# Altium footprint library poyu.PcbLib: 22 footprints (part 1 of 2)
Each footprint in its own frame and in the unit in brackets; x right, y up, seen from the top. Pads: shape width x height; smd on the part's side, far side on the other; paste and mask are expansions set on the pad; w line width, h text height; cw(c..) or ccw(c..) is an arc to the next point about the centre after c.
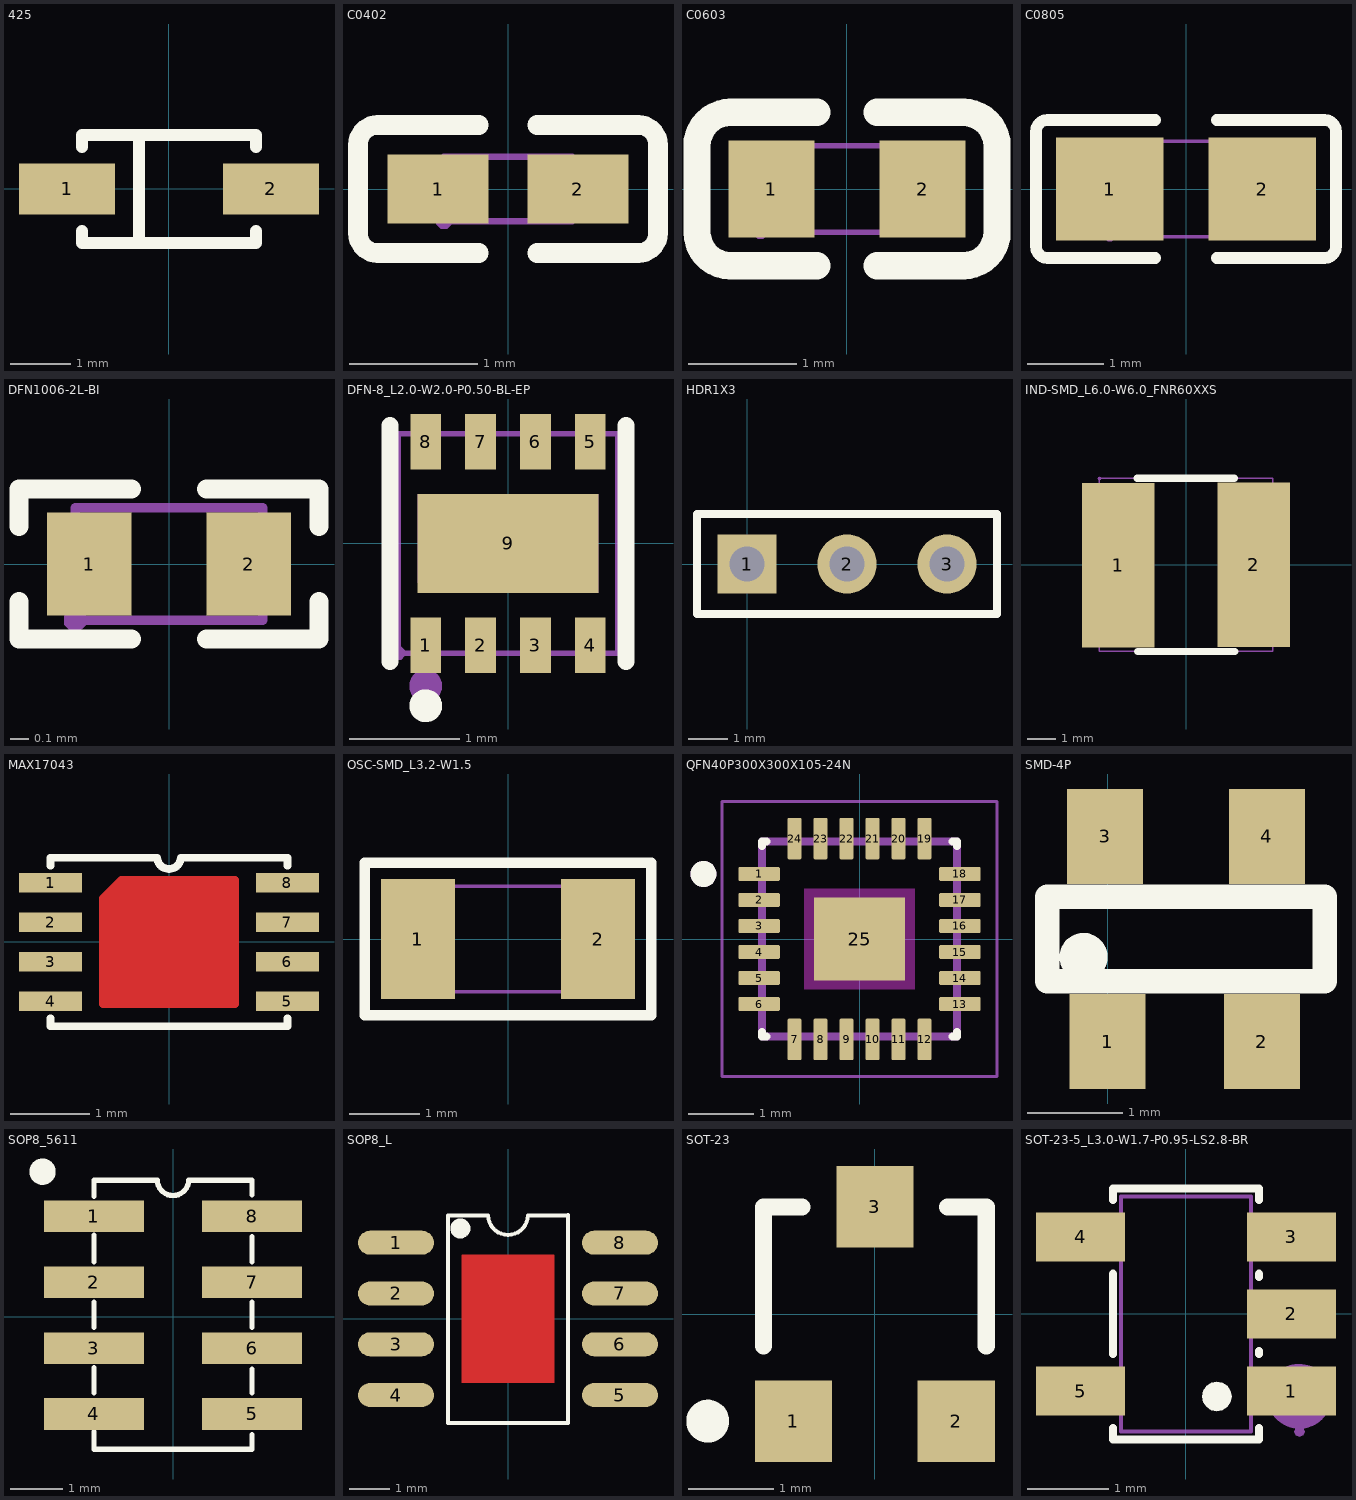
[diagram p0: the footprints below, top view; thin cyan lines are the x and y axes]

## 425 [mm]
pads (2):
  rect 1.6x0.85 smd: 1(-1.7,0) 2(1.7,0)
Top Overlay:
  lines w0.2: -1.45,-0.7 -1.45,-0.9 1.45,-0.9 1.45,-0.7 ; -1.45,0.7 -1.45,0.9 1.45,0.9 1.45,0.7 ; -0.5,-0.9 -0.5,0.9

## C0402 [mm]
pads (2):
  rect 0.79x0.54 smd paste-100 mask+0.051: 1(-0.545,0) 2(0.545,0)
Top Overlay:
  lines w0.152: -0.226,-0.499 -1.016,-0.499 cw(c-1.016,-0.346) -1.169,-0.346 -1.169,0.346 cw(c-1.016,0.346) -1.016,0.499 -0.226,0.499 ; 0.226,-0.499 1.016,-0.499 ccw(c1.016,-0.346) 1.169,-0.346 1.169,0.346 ccw(c1.016,0.346) 1.016,0.499 0.226,0.499
Top Paste:
  region: 0.78,0.225 0.78,-0.225 0.73,-0.275 0.25,-0.275 0.18,-0.225 0.18,0.225 0.25,0.275 0.73,0.275
  region: -0.18,0.225 -0.18,-0.225 -0.25,-0.275 -0.73,-0.275 -0.78,-0.225 -0.78,0.225 -0.73,0.275 -0.25,0.275
Mechanical 15:
  region: 0.5,-0.25 0.5,0.25 0.25,0.25 0.25,-0.25
  region: -0.5,-0.25 -0.5,0.25 -0.25,0.25 -0.25,-0.25
  region: -0.44,-0.25 -0.44,-0.275 -0.475,-0.31 -0.525,-0.31 -0.56,-0.275 -0.56,-0.25 -0.56,-0.225 -0.525,-0.19 -0.475,-0.19 -0.44,-0.225 -0.44,-0.25
  lines w0.051: -0.5,-0.25 0.5,-0.25 0.5,0.25 -0.5,0.25 -0.5,-0.25

## C0603 [mm]
pads (2):
  rect 0.8x0.9 smd: 1(-0.7,0) 2(0.7,0)
Top Overlay:
  lines w0.254: -1.08,-0.71 -0.28,-0.71 ; -1.08,0.71 -0.28,0.71 ; -1.08,-0.71 cw(c-1.08,-0.4) -1.39,-0.4 -1.39,0.4 cw(c-1.08,0.4) -1.08,0.71 ; 0.28,-0.71 1.08,-0.71 ccw(c1.08,-0.4) 1.39,-0.4 1.39,0.4 ccw(c1.08,0.4) 1.08,0.71 0.28,0.71
Mechanical 15:
  region: 0.8,-0.4 0.8,0.4 0.5,0.4 0.5,-0.4
  region: -0.8,-0.4 -0.8,0.4 -0.5,0.4 -0.5,-0.4
  region: -0.74,-0.4 -0.74,-0.425 -0.775,-0.46 -0.825,-0.46 -0.86,-0.425 -0.86,-0.4 -0.86,-0.375 -0.825,-0.34 -0.775,-0.34 -0.74,-0.375 -0.74,-0.4
  lines w0.051: -0.8,-0.4 0.8,-0.4 0.8,0.4 -0.8,0.4 -0.8,-0.4

## C0805 [mm]
pads (2):
  rect 1.41x1.35 smd paste-100 mask+0.051: 1(-1,0) 2(1,0)
Top Overlay:
  lines w0.152: -0.401,-0.904 -1.811,-0.904 cw(c-1.811,-0.751) -1.964,-0.751 -1.964,0.751 cw(c-1.811,0.751) -1.811,0.904 -0.401,0.904 ; 0.401,-0.904 1.811,-0.904 ccw(c1.811,-0.751) 1.964,-0.751 1.964,0.751 ccw(c1.811,0.751) 1.811,0.904 0.401,0.904
Top Paste:
  region: -1.705,-0.64 -1.705,0.64 -1.655,0.69 -0.505,0.69 -0.455,0.64 -0.45,0.23 -0.9,0.23 -0.9,-0.22 -0.46,-0.22 -0.455,-0.64 -0.505,-0.69 -1.655,-0.69
  region: 1.705,0.64 1.705,-0.64 1.655,-0.69 0.505,-0.69 0.455,-0.64 0.45,-0.23 0.9,-0.23 0.9,0.22 0.46,0.22 0.455,0.64 0.505,0.69 1.655,0.69
Mechanical 15:
  region: -0.94,-0.625 -0.94,-0.65 -0.975,-0.685 -1.025,-0.685 -1.06,-0.65 -1.06,-0.625 -1.06,-0.6 -1.025,-0.565 -0.975,-0.565 -0.94,-0.6 -0.94,-0.625
  region: -1,-0.625 -1,0.625 -0.5,0.625 -0.5,-0.625
  region: 1,0.625 1,-0.625 0.5,-0.625 0.5,0.625
  lines w0.051: -1,-0.625 -1,0.625 1,0.625 1,-0.625 -1,-0.625

## DFN1006-2L-BI [mm]
pads (2):
  rect 0.45x0.55 smd: 1(-0.425,0) 2(0.425,0)
Top Overlay:
  lines w0.102: -0.8,-0.2 -0.8,-0.4 -0.2,-0.4 ; -0.8,0.2 -0.8,0.4 -0.2,0.4 ; 0.2,-0.4 0.8,-0.4 0.8,-0.2 ; 0.2,0.4 0.8,0.4 0.8,0.2
Mechanical 15:
  region: -0.44,-0.3 -0.44,-0.325 -0.475,-0.36 -0.525,-0.36 -0.56,-0.325 -0.56,-0.3 -0.56,-0.275 -0.525,-0.24 -0.475,-0.24 -0.44,-0.275 -0.44,-0.3
  region: -0.475,0.254 -0.225,0.254 -0.225,-0.254 -0.475,-0.254
  region: 0.225,0.254 0.475,0.254 0.475,-0.254 0.225,-0.254
  lines w0.051: -0.5,-0.3 0.5,-0.3 0.5,0.3 -0.5,0.3 -0.5,-0.3

## DFN-8_L2.0-W2.0-P0.50-BL-EP [mm]
pads (9):
  rect 0.28x0.505 smd: 1(-0.75,-0.928) 2(-0.25,-0.928) 3(0.25,-0.928) 4(0.75,-0.928) 5(0.75,0.928) 6(0.25,0.928) 7(-0.25,0.928) 8(-0.75,0.928)
  rect 1.65x0.9 smd: 9(0,0)
Top Overlay:
  circle w0.15: c-0.75,-1.48 r0.075
  lines w0.152: -1.076,-1.076 -1.076,1.076 ; 1.076,-1.076 1.076,1.076
Mechanical 6:
  circle w0.15: c-0.75,-1.3 r0.075
Mechanical 15:
  region: -0.825,-0.36 -0.825,0.45 0.825,0.45 0.825,-0.45 -0.735,-0.45
  region: -0.875,1 -0.875,0.7 -0.625,0.7 -0.625,1
  region: -0.375,1 -0.375,0.7 -0.125,0.7 -0.125,1
  region: 0.125,1 0.125,0.7 0.375,0.7 0.375,1
  region: 0.625,1 0.625,0.7 0.875,0.7 0.875,1
  region: 0.625,-1 0.625,-0.7 0.875,-0.7 0.875,-1
  region: 0.125,-1 0.125,-0.7 0.375,-0.7 0.375,-1
  region: -0.375,-1 -0.375,-0.7 -0.125,-0.7 -0.125,-1
  region: -0.875,-1 -0.875,-0.7 -0.625,-0.7 -0.625,-1
  region: -0.94,-1 -0.94,-1.025 -0.975,-1.06 -1.025,-1.06 -1.06,-1.025 -1.06,-1 -1.06,-0.975 -1.025,-0.94 -0.975,-0.94 -0.94,-0.975 -0.94,-1
  lines w0.051: -1,-1 1,-1 1,1 -1,1 -1,-1

## HDR1X3 [mm] "Connector; Header; 3 Position"
pads (3):
  rect 1.5x1.5 hole 0.9: 1(0,0)
  round 1.5 hole 0.9: 2(2.54,0) 3(5.08,0)
Top Overlay:
  lines w0.2: -1.27,-1.27 -1.27,1.27 6.35,1.27 6.35,-1.27 -1.27,-1.27

## IND-SMD_L6.0-W6.0_FNR60XXS [mm]
pads (2):
  rect 2.5x5.7 smd: 1(-2.35,-0.013) 2(2.35,0.013)
Top Overlay:
  lines w0.254: -1.693,3 1.671,3 ; -1.671,-3 1.693,-3
Mechanical 15:
  region: -2.935,3 -2.954,2.954 -3,2.935 -3.046,2.954 -3.065,3 -3.046,3.046 -3,3.065 -2.954,3.046
  region: -1.45,2.437 -1.45,-2.463 -3,-2.463 -3,2.437
  region: 1.45,-2.437 1.45,2.463 3,2.463 3,-2.437
  lines w0.051: -3,-3 3,-3 3,3 -3,3 -3,-3

## MAX17043 [mm]
pads (8):
  rect 0.8x0.25 smd: 1(-1.5,0.75) 2(-1.5,0.25) 3(-1.5,-0.25) 4(-1.5,-0.75) 5(1.5,-0.75) 6(1.5,-0.25) 7(1.5,0.25) 8(1.5,0.75)
Top Layer:
  region: -0.838,0.508 -0.605,0.787 0.838,0.787 0.838,-0.787 -0.838,-0.787
  lines w0.1: -0.838,-0.787 -0.838,0.508 -0.838,0.555 -0.605,0.787 0.838,0.787 0.838,-0.787 -0.838,-0.787
Top Overlay:
  lines w0.1: -1.499,-0.965 -1.499,-1.067 1.499,-1.067 1.499,-0.965 ; -1.499,0.965 -1.499,1.067 -0.5,1.067 ; -0.508,1.067 -0.152,1.067 ; -0.15,1.067 ccw(c0,1.076) 0.15,1.067 ; 0.152,1.067 0.508,1.067 ; 0.5,1.067 1.491,1.067 ; 1.499,0.965 1.499,1.067
Top Solder:
  region: -0.914,0.889 0.914,0.889 0.914,-0.889 -0.914,-0.889

## OSC-SMD_L3.2-W1.5 [mm]
pads (2):
  rect 1.05x1.7 smd: 1(-1.275,0) 2(1.275,0)
Top Overlay:
  lines w0.152: -2.029,-1.079 2.029,-1.079 2.029,1.079 -2.029,1.079 -2.029,-1.079
Mechanical 15:
  region: 0.85,-0.75 0.85,0.75 1.5,0.75 1.5,-0.75
  region: -0.85,-0.75 -0.85,0.75 -1.5,0.75 -1.5,-0.75
  region: -1.535,-0.75 -1.554,-0.796 -1.6,-0.815 -1.646,-0.796 -1.665,-0.75 -1.646,-0.704 -1.6,-0.685 -1.554,-0.704
  lines w0.051: -1.6,-0.75 1.6,-0.75 1.6,0.75 -1.6,0.75 -1.6,-0.75

## QFN40P300X300X105-24N [mm]
height 1.05
pads (25):
  rrect25% 0.64x0.22 smd: 1(-1.545,1) 2(-1.545,0.6) 3(-1.545,0.2) 4(-1.545,-0.2) 5(-1.545,-0.6) 6(-1.545,-1) 13(1.545,-1) 14(1.545,-0.6) 15(1.545,-0.2) 16(1.545,0.2) 17(1.545,0.6) 18(1.545,1)
  rrect25% 0.22x0.64 smd: 7(-1,-1.545) 8(-0.6,-1.545) 9(-0.2,-1.545) 10(0.2,-1.545) 11(0.6,-1.545) 12(1,-1.545) 19(1,1.545) 20(0.6,1.545) 21(0.2,1.545) 22(-0.2,1.545) 23(-0.6,1.545) 24(-1,1.545)
  rect 1.397x1.27 smd: 25(0,0)
Top Overlay:
  circle w0.2: c-2.4,1 r0.1
  lines w0.127: -1.5,-1.43 -1.5,-1.5 -1.43,-1.5 ; -1.5,1.43 -1.5,1.5 -1.43,1.5 ; 1.43,-1.5 1.5,-1.5 1.5,-1.43 ; 1.43,1.5 1.5,1.5 1.5,1.43
Keep-Out Layer:
  region: 0.85,-0.77 -0.85,-0.77 -0.85,0.77 0.85,0.77
Mechanical 13:
  circle w0.2: c-2.4,1 r0.1
  lines w0.127: -1.5,-1.5 -1.5,1.5 1.5,1.5 1.5,-1.5 -1.5,-1.5
Mechanical 15:
  lines w0.05: -2.115,-2.115 -2.115,2.115 2.115,2.115 2.115,-2.115 -2.115,-2.115
3D body: height 1, standoff -0.05, extent -1.5,-1.5 1.5,1.5

## SMD-4P [mm]
pads (4):
  rect 0.8x1 smd: 1(0,1.143) 2(1.626,1.143) 3(-0.025,3.302) 4(1.676,3.302)
Top Overlay:
  circle w0.254: c-0.254,2.032 r0.127
  lines w0.254: -0.635,1.778 2.286,1.778 2.286,2.667 -0.635,2.667 -0.635,1.778

## SOP8_5611 [mm]
pads (8):
  rect 1.9x0.6 smd: 1(-1.5,1.905) 2(-1.5,0.655) 3(-1.5,-0.595) 4(-1.5,-1.845) 5(1.5,-1.845) 6(1.5,-0.595) 7(1.5,0.655) 8(1.5,1.905)
Top Overlay:
  circle w0.25: c-2.477,2.755 r0.125
  lines w0.1: -1.5,-2.515 1.5,-2.515 ; -1.499,-2.515 -1.499,-2.184 ; -1.499,-1.448 -1.499,-0.965 ; -1.499,-0.203 -1.499,0.279 ; -1.499,1.041 -1.499,1.549 ; -1.499,2.286 -1.499,2.591 -0.5,2.591 ; -0.508,2.591 -0.305,2.591 ; -0.3,2.595 ccw(c0,2.6) 0.3,2.595 ; 0.305,2.591 0.508,2.591 ; 0.5,2.591 1.491,2.591 ; 1.499,-2.515 1.499,-2.235 ; 1.499,-1.448 1.499,-0.991 ; 1.499,-0.203 1.499,0.279 ; 1.499,1.041 1.499,1.524 ; 1.499,2.311 1.499,2.591

## SOP8_L [mm]
pads (8):
  oval 1.9x0.6 smd: 1(-2.8,1.905) 2(-2.8,0.635) 3(-2.8,-0.635) 4(-2.8,-1.905) 5(2.8,-1.905) 6(2.8,-0.635) 7(2.8,0.635) 8(2.8,1.905)
Top Layer:
  region: -1.15,1.6 1.15,1.6 1.15,-1.6 -1.15,-1.6
Top Overlay:
  circle w0.25: c-1.192,2.261 r0.125
  lines w0.1: 1.491,2.591 0.5,2.591 cw(c0,2.6) -0.5,2.591 -1.5,2.591 -1.5,-2.6 1.499,-2.6 ; 1.5,-2.6 1.5,2.6
Top Solder:
  region: -1.168,1.626 1.168,1.626 1.168,-1.626 -1.168,-1.626
Mechanical 3:
  lines w0.1: -0.5,0 0.5,0 ; 0,-0.5 0,0.5

## SOT-23 [mm]
pads (3):
  rect 0.9x0.95 smd: 1(-0.95,-1.25) 2(0.95,-1.25) 3(0,1.25)
Top Overlay:
  circle w0.25: c-1.95,-1.25 r0.125
  lines w0.2: -1.3,-0.375 -1.3,1.25 -0.85,1.25 ; 0.85,1.25 1.3,1.25 1.3,-0.375

## SOT-23-5_L3.0-W1.7-P0.95-LS2.8-BR [mm]
pads (5):
  rect 1.1x0.6 smd: 1(1.3,-0.95) 2(1.3,0) 3(1.3,0.95) 4(-1.3,0.95) 5(-1.3,-0.95)
Top Overlay:
  region: 0.201,-1.016 0.201,-1.014 0.214,-0.945 0.253,-0.886 0.312,-0.847 0.381,-0.833 0.45,-0.847 0.509,-0.886 0.548,-0.945 0.561,-1.014 0.561,-1.016 0.561,-1.018 0.548,-1.087 0.509,-1.146 0.45,-1.185 0.381,-1.199 0.312,-1.185 0.253,-1.146 0.214,-1.087 0.201,-1.018
  lines w0.1: -0.9,-1.404 -0.9,-1.55 0.9,-1.55 0.9,-1.404 ; -0.9,-0.496 -0.9,0.496 ; -0.9,1.404 -0.9,1.55 0.9,1.55 0.9,1.404 ; 0.9,-0.496 0.9,-0.454 ; 0.9,0.454 0.9,0.496
Mechanical 6:
  circle w0.4: c1.397,-1.016 r0.2
Mechanical 15:
  region: -1.4,-1.15 -1.4,-0.75 -0.95,-0.75 -0.95,-1.15
  region: -0.96,-1.15 -0.96,-0.75 -0.79,-0.75 -0.79,-1.15
  region: -1.4,0.75 -1.4,1.15 -0.95,1.15 -0.95,0.75
  region: -0.96,0.75 -0.96,1.15 -0.79,1.15 -0.79,0.75
  region: 0.95,0.75 0.95,1.15 1.4,1.15 1.4,0.75
  region: 0.79,0.75 0.79,1.15 0.96,1.15 0.96,0.75
  region: 0.95,-0.2 0.95,0.2 1.4,0.2 1.4,-0.2
  region: 0.79,-0.2 0.79,0.2 0.96,0.2 0.96,-0.2
  region: 0.95,-1.15 0.95,-0.75 1.4,-0.75 1.4,-1.15
  region: 0.79,-1.15 0.79,-0.75 0.96,-0.75 0.96,-1.15
  region: 1.465,-1.45 1.446,-1.496 1.4,-1.515 1.354,-1.496 1.335,-1.45 1.354,-1.404 1.4,-1.385 1.446,-1.404
  lines w0.051: -0.8,-1.45 -0.8,1.45 0.8,1.45 0.8,-1.45 -0.8,-1.45